# Altium schematic symbol library Mylibrary.SchLib: 6 symbols
Pins are listed as number, name and electrical type; pins without a type are passive.

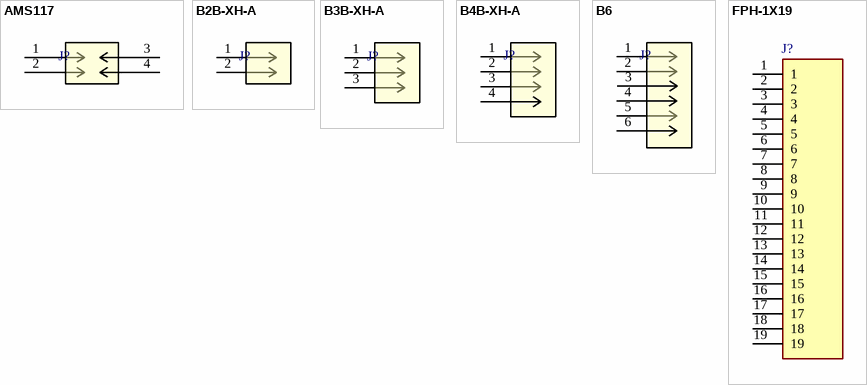
[diagram p0: symbols AMS117 to FPH-1X19]

## AMS117
designator J?  (value not drawn)
Description; Copyright: Copyright (C) 2026 Ultra Librarian. All rights reserved.; Type: Type
pins: 1, 2, 3, 4

## B2B-XH-A
designator J?  (value not drawn)
Description; Manufacturer_Name: JST; Copyright: Copyright (C) 2026 Ultra Librarian. All rights reserved.; Manufacturer_Part_Number: B2B-XH-A; RefDes: RefDes; Type: Type
footprint JST_B2B-XH-A
pins: 1, 2

## B3B-XH-A
designator J?  (value not drawn)
Description; Manufacturer_Name: JST; Copyright: Copyright (C) 2026 Ultra Librarian. All rights reserved.; Manufacturer_Part_Number: B3B-XH-A; RefDes: RefDes; Type: Type
footprint JST_B3B-XH-A
pins: 1, 2, 3

## B4B-XH-A
designator J?  (value not drawn)
Description; Manufacturer_Name: JST; Copyright: Copyright (C) 2026 Ultra Librarian. All rights reserved.; Manufacturer_Part_Number: B4B-XH-A; RefDes: RefDes; Type: Type
footprint JST_B4B-XH-A(LF)(SN)
pins: 1, 2, 3, 4 3

## B6
designator J?  (value not drawn)
Description; Manufacturer_Name: JST; Manufacturer_Part_Number: B4B-XH-A; Copyright: Copyright (C) 2026 Ultra Librarian. All rights reserved.; RefDes: RefDes; Type: Type
pins: 1, 2, 3, 4, 5, 6

## FPH-1X19
designator J?, comment SSK02-FPH-254-A19  (value not drawn)
2.54 mm Female Header, 1 x 19 Pin, Straight, PA6T, Gold Flash, Rectangular Connector; Manufacturer_Name: Same Sky; Geometry.Height: 8.7mm; Mouser Part Number: *; Mouser Price/Stock: *; Manufacturer_Part_Number: SSK02-FPH-254-A19; Datasheet Link: https://www.sameskydevices.com/product/resource/ssk02-fph-254.pdf
footprint RHDR19W69P0X254_1X19_4876X250X870P
pins: 1, 2, 3, 4, 5, 6, 7, 8, 9, 10, 11, 12, 13, 14, 15, 16, 17, 18, 19